# Altium footprint library Boost_Converter.PcbLib: 6 footprints
Each footprint in its own frame and in the unit in brackets; x right, y up, seen from the top. Pads: shape width x height; smd on the part's side, far side on the other; paste and mask are expansions set on the pad; w line width, h text height; cw(c..) or ccw(c..) is an arc to the next point about the centre after c.
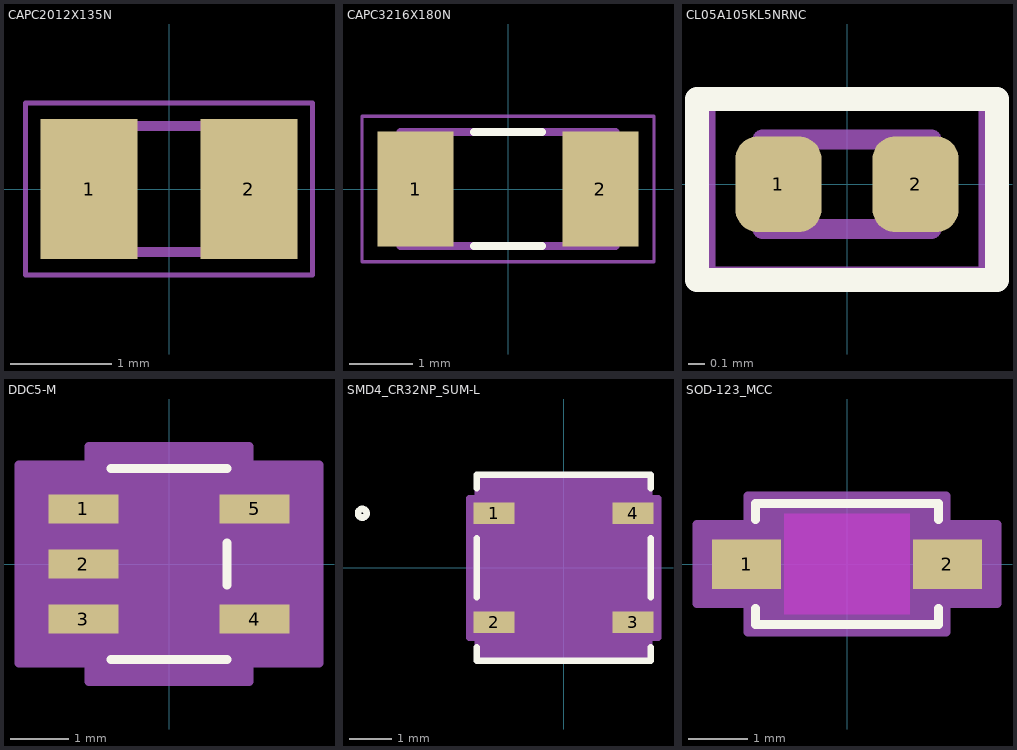
[diagram p0: the footprints below, top view; thin cyan lines are the x and y axes]

## CAPC2012X135N [mm] "6.3V 4.7uF X5R 20% 0805"
pads (2):
  rect 0.96x1.39 smd: 1(-0.79,0) 2(0.79,0)
Mechanical 15:
  lines w0.1: -1,-0.625 1,-0.625 1,0.625 -1,0.625 -1,-0.625
Mechanical 20:
  lines w0.05: -1.42,-0.85 1.42,-0.85 1.42,0.85 -1.42,0.85 -1.42,-0.85

## CAPC3216X180N [mm]
pads (2):
  rect 1.2x1.82 smd paste+0 mask+0.102: 1(-1.46,0) 2(1.46,0)
Top Overlay:
  lines w0.127: -0.54,-0.9 0.54,-0.9 ; -0.54,0.9 0.54,0.9
Mechanical 13:
  lines w0.127: -1.7,-0.9 1.7,-0.9 1.7,0.9 -1.7,0.9 -1.7,-0.9
Mechanical 15:
  lines w0.05: -2.308,-1.15 2.308,-1.15 2.308,1.15 -2.308,1.15 -2.308,-1.15
3D body "step_temp.STEP": height 1.25, standoff 0, extent -1.6,-0.8 1.6,0.8

## CL05A105KL5NRNC [mm]
height 0.254
pads (2):
  rrect53% 0.54x0.6 smd: 1(-0.43,0) 2(0.43,0)
Top Overlay:
  lines w0.152: -0.94,-0.6 0.94,-0.6 0.94,0.533 -0.94,0.533 -0.94,-0.6
Top 3D Body:
  lines w0.127: -0.53,-0.28 -0.53,0.28 0.53,0.28 0.53,-0.28 -0.53,-0.28
Top Courtyard:
  lines w0.05: -0.85,-0.54 -0.85,0.54 0.85,0.54 0.85,-0.54 -0.85,-0.54
3D body "CL05A105KL5NRNC.STEP": height 0.55, standoff 0, extent -0.5,-0.25 0.5,0.25

## DDC5-M [mil]
pads (5):
  rect 47.5x20 smd paste+0 mask+0: 1(-58.25,37.4) 2(-58.25,0) 3(-58.25,-37.4) 4(58.25,-37.4) 5(58.25,37.4)
Top Overlay:
  lines w6: -39.5,-65 39.5,-65 ; -39.5,65 39.5,65 ; 39.5,-14.3 39.5,14.3
Mechanical 13:
  lines w1: -12,60 ccw(c0,60) 12,60 ; -60,-47.4 -34.5,-47.4 -34.5,-27.4 -60,-27.4 -60,-47.4 ; -60,-10 -34.5,-10 -34.5,10 -60,10 -60,-10 ; -60,27.4 -34.5,27.4 -34.5,47.4 -60,47.4 -60,27.4 ; -34.5,-60 -34.5,60 34.5,60 34.5,-60 -34.5,-60 ; 34.5,-47.4 60,-47.4 60,-27.4 34.5,-27.4 34.5,-47.4 ; 34.5,27.4 60,27.4 60,47.4 34.5,47.4 34.5,27.4
  text "*" at -37,14.4 h50
  text ".Designator" at -137.5,-25 h50
Mechanical 15:
  region: 54.5,-80 -54.5,-80 -54.5,-67.4 -102,-67.4 -102,67.4 -54.5,67.4 -54.5,80 54.5,80 54.5,67.4 102,67.4 102,-67.4 54.5,-67.4
  lines w6: -102,-67.4 -102,67.4 -54.5,67.4 -54.5,80 54.5,80 54.5,67.4 102,67.4 102,-67.4 54.5,-67.4 54.5,-80 -54.5,-80 -54.5,-67.4 -102,-67.4
3D body "DDC5.step": height 43.11, standoff 0, extent -60,-60 60,60

## SMD4_CR32NP_SUM-L [mm]
pads (4):
  rect 0.962x0.509 smd paste+0 mask+0: 1(-1.624,1.275) 2(-1.624,-1.275) 3(1.624,-1.275) 4(1.624,1.275)
Top Overlay:
  circle w0.152: c-4.706,1.275 r0.102
  lines w0.152: -2.032,-1.862 -2.032,-2.172 2.032,-2.172 2.032,-1.862 ; -2.032,-0.688 -2.032,0.688 ; -2.032,1.862 -2.032,2.172 2.032,2.172 2.032,1.862 ; 2.032,-0.688 2.032,0.688
  text ".Designator" at -3.492,-0.635 h1.27
Mechanical 13:
  circle w0.025: c-1.143,1.275 r0.076
  lines w0.025: -0.305,2.045 ccw(c0,2.045) 0.305,2.045 ; -1.905,-2.045 1.905,-2.045 1.905,2.045 -1.905,2.045 -1.905,-2.045
  text ".Designator" at -3.492,-0.635 h1.27
Mechanical 15:
  region: -2.007,-1.631 -2.207,-1.631 -2.207,1.631 -2.007,1.631 -2.007,2.146 2.007,2.146 2.007,1.631 2.207,1.631 2.207,-1.631 2.007,-1.631 2.007,-2.146 -2.007,-2.146
  lines w0.152: -2.207,-1.631 -2.207,1.631 -2.007,1.631 -2.007,2.146 2.007,2.146 2.007,1.631 2.207,1.631 2.207,-1.631 2.007,-1.631 2.007,-2.146 -2.007,-2.146 -2.007,-1.631 -2.207,-1.631
3D body "SMD4_CR32NP_SUM.step": height 3, standoff 0, extent -1.905,-2.045 1.905,2.045

## SOD-123_MCC [mil]
pads (2):
  rect 46x33 smd paste+0 mask+0: 1(-67,0) 2(67,0)
Top Overlay:
  lines w6: -61,-29.6 -61,-40.5 61,-40.5 61,-29.6 ; -61,29.6 -61,40.5 61,40.5 61,29.6
Keep-Out Layer:
  region: -42,-33.5 -42,33.5 42,33.5 42,-33.5
Mechanical 13:
  lines w1: -56,-17.75 -38.25,-35.5 ; -56,17.75 -38.25,35.5 ; -76,-15.5 -56,-15.5 -56,15.5 -76,15.5 -76,-15.5 ; -56,-35.5 -56,35.5 56,35.5 56,-35.5 -56,-35.5 ; 56,-15.5 76,-15.5 76,15.5 56,15.5 56,-15.5
  text "RefDes2" at -87.5,-25 h50
  text "*" at -58.5,-25 h50
Mechanical 15:
  region: -66,-26.5 -100,-26.5 -100,26.5 -66,26.5 -66,45.5 66,45.5 66,26.5 100,26.5 100,-26.5 66,-26.5 66,-45.5 -66,-45.5
  lines w6: -100,-26.5 -66,-26.5 -66,-45.5 66,-45.5 66,-26.5 100,-26.5 100,26.5 66,26.5 66,45.5 -66,45.5 -66,26.5 -100,26.5 -100,-26.5
3D body "SOD-123_MCC.step": height 53.11, standoff 0, extent -75.98,-35.51 75.98,35.51